# Altium footprint library PcbLib1.PcbLib: 43 footprints (part 3 of 3)
Each footprint in its own frame and in the unit in brackets; x right, y up, seen from the top. Pads: shape width x height; smd on the part's side, far side on the other; paste and mask are expansions set on the pad; w line width, h text height; cw(c..) or ccw(c..) is an arc to the next point about the centre after c.
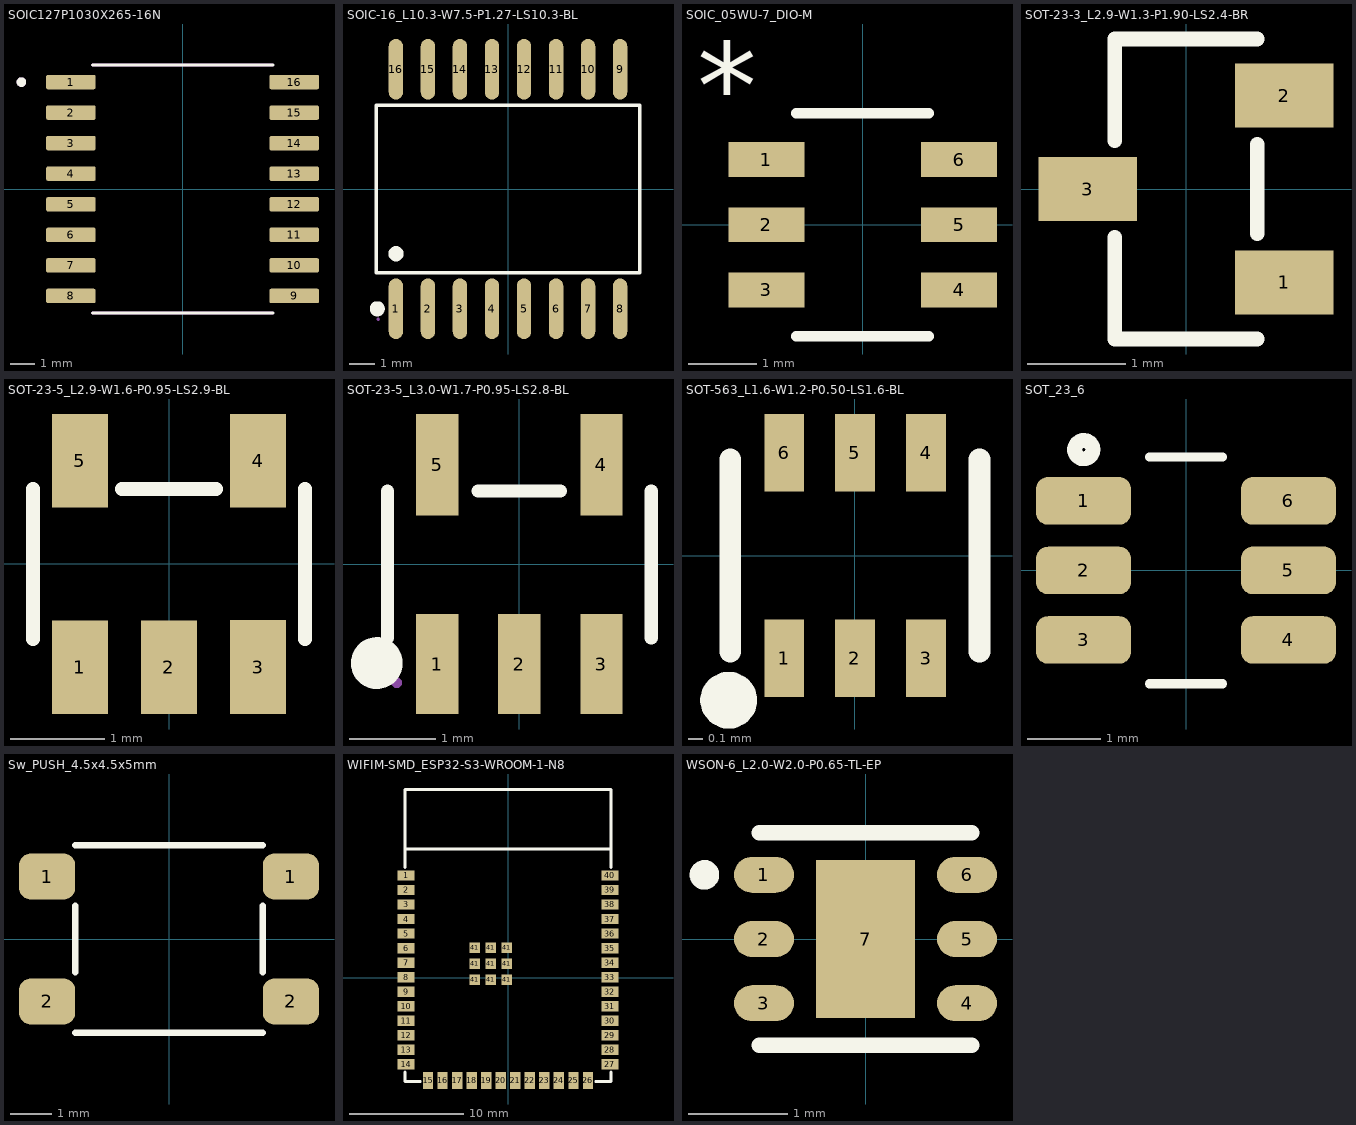
[diagram p2: the footprints below, top view; thin cyan lines are the x and y axes]

## SOIC127P1030X265-16N [mm]
height 2.65
pads (16):
  rrect25% 2.06x0.6 smd: 1(-4.64,4.445) 2(-4.64,3.175) 3(-4.64,1.905) 4(-4.64,0.635) 5(-4.64,-0.635) 6(-4.64,-1.905) 7(-4.64,-3.175) 8(-4.64,-4.445) 9(4.64,-4.445) 10(4.64,-3.175) 11(4.64,-1.905) 12(4.64,-0.635) 13(4.64,0.635) 14(4.64,1.905) 15(4.64,3.175) 16(4.64,4.445)
Top Overlay:
  circle w0.2: c-6.7,4.445 r0.1
  lines w0.127: -3.75,-5.15 3.75,-5.15 ; -3.75,5.15 3.75,5.15
Mechanical 13:
  circle w0.2: c-6.7,4.445 r0.1
  lines w0.127: -3.75,-5.15 3.75,-5.15 ; -3.75,5.15 3.75,5.15
3D body "step_temp.STEP": height 2.65, standoff 0, extent -5.15,-5.15 5.15,5.15

## SOIC-16_L10.3-W7.5-P1.27-LS10.3-BL [mil]
pads (16):
  oval 22.6x94.5 smd: 1(-175,-187) 2(-125,-187) 3(-75,-187) 4(-25,-187) 5(25,-187) 6(75,-187) 7(125,-187) 8(175,-187) 9(175,187) 10(125,187) 11(75,187) 12(25,187) 13(-25,187) 14(-75,187) 15(-125,187) 16(-175,187)
Top Overlay:
  lines w6: -205.7,-130.8 -205.7,130.7 205.8,130.7 205.8,-130.8 -205.7,-130.8
  lines w11.8: -210,-187 -209.6,-189.1 -208.6,-190.8 -207,-192.2 -205.1,-192.9 -203.1,-192.9 -201.1,-192.2 -199.6,-190.8 -198.5,-189.1 -198.2,-187 -198.5,-185 -199.6,-183.2 -201.1,-181.9 -203.1,-181.2 -205.1,-181.2 -207,-181.9 -208.6,-183.2 -209.6,-185 -210,-187 ; -180.9,-101.2 -180.5,-103.2 -179.5,-105 -177.9,-106.3 -176,-107 -174,-107 -172,-106.3 -170.5,-105 -169.4,-103.2 -169.1,-101.2 -169.4,-99.1 -170.5,-97.4 -172,-96 -174,-95.3 -176,-95.3 -177.9,-96 -179.5,-97.4 -180.5,-99.1 -180.9,-101.2
Mechanical 8:
  region: -200.4,-203.3 -200.8,-204.6 -201.8,-205.4 -203.1,-205.6 -204.3,-205.1 -205,-203.9 -205,-202.6 -204.3,-201.5 -203.1,-200.9 -201.8,-201.1 -200.8,-202
3D body "DW0016B.stp": height 101.81, standoff 0, extent -202.76,-203.44 202.76,203.44

## SOIC_05WU-7_DIO-M [mil]
pads (6):
  rect 43.5x20 smd paste+0: 1(-55.25,37.4) 2(-55.25,0) 3(-55.25,-37.4) 4(55.25,-37.4) 5(55.25,0) 6(55.25,37.4)
Top Overlay:
  lines w6: -38,-64 38,-64 ; -38,64 38,64
  text "*" at -95,55 h50
3D body "step_temp.STEP": height 39.37, standoff 0, extent -57.09,-57.09 57.09,57.09

## SOT-23-3_L2.9-W1.3-P1.90-LS2.4-BR [mm]
pads (3):
  rect 1.001x0.65 smd: 1(0.998,-0.95) 2(0.998,0.95) 3(-1.001,0)
Top Overlay:
  lines w0.152: -0.726,-0.495 -0.726,-1.527 0.724,-1.527 ; -0.726,0.495 -0.726,1.527 0.724,1.527 ; 0.724,-0.455 0.724,0.455

## SOT-23-5_L2.9-W1.6-P0.95-LS2.9-BL [mm]
pads (5):
  rect 0.6x1 smd paste+0: 1(-0.95,-1.1) 2(0,-1.1) 3(0.95,-1.1) 4(0.95,1.1) 5(-0.95,1.1)
Top Overlay:
  lines w0.15: -1.45,-0.8 -1.45,0.8 ; -0.5,0.8 0.5,0.8 ; 1.45,-0.8 1.45,0.8
3D body "SOT-23-5.STEP": height 1.2, standoff 0, extent -1.45,-1.4 1.45,1.4

## SOT-23-5_L3.0-W1.7-P0.95-LS2.8-BL [mm]
pads (5):
  rect 0.49x1.157 smd: 1(-0.95,-1.154) 2(0,-1.154) 3(0.95,-1.154)
  rect 0.49x1.175 smd: 4(0.95,1.154) 5(-0.95,1.154)
Top Overlay:
  circle w0.3: c-1.651,-1.143 r0.15
  lines w0.152: -1.526,-0.851 -1.526,0.851 ; -0.476,0.851 0.476,0.851 ; 1.526,-0.851 1.526,0.851
Mechanical 7:
  region: -1.125,0.74 -1.125,1.01 -0.775,1.01 -0.775,0.74
  region: 0.775,0.74 0.775,1.01 1.125,1.01 1.125,0.74
  region: 0.775,-1.01 0.775,-0.74 1.125,-0.74 1.125,-1.01
  region: -0.175,-1.01 -0.175,-0.74 0.175,-0.74 0.175,-1.01
  region: -1.125,-1.01 -1.125,-0.74 -0.775,-0.74 -0.775,-1.01
Mechanical 8:
  region: -1.36,-1.37 -1.36,-1.395 -1.395,-1.43 -1.445,-1.43 -1.48,-1.395 -1.48,-1.37 -1.48,-1.345 -1.445,-1.31 -1.395,-1.31 -1.36,-1.345 -1.36,-1.37
Mechanical 9:
  region: -1.125,1 -1.125,1.4 -0.775,1.4 -0.775,1
  region: 0.775,1 0.775,1.4 1.125,1.4 1.125,1
  region: 0.775,-1.4 0.775,-1 1.125,-1 1.125,-1.4
  region: -0.175,-1.4 -0.175,-1 0.175,-1 0.175,-1.4
  region: -1.125,-1.4 -1.125,-1 -0.775,-1 -0.775,-1.4

## SOT-563_L1.6-W1.2-P0.50-LS1.6-BL [mil]
pads (6):
  rect 11x21.5 smd: 1(-19.6,-28.4) 2(0,-28.4) 3(19.7,-28.4) 4(19.7,28.5) 5(0,28.5) 6(-19.6,28.5)
Top Overlay:
  lines w6: -34.5,-26.6 -34.5,26.7 ; 34.5,-26.6 34.5,26.7
  lines w7.9: -38.9,-40 -38.5,-38.3 -37.4,-36.9 -35.8,-36.1 -34.1,-36.1 -32.5,-36.9 -31.4,-38.3 -31,-40 -31.4,-41.7 -32.5,-43 -34.1,-43.8 -35.8,-43.8 -37.4,-43 -38.5,-41.7 -38.9,-40

## SOT_23_6 [mm]
height 1.45
pads (6):
  rrect50% 1.3x0.65 smd: 1(-1.4,0.95) 2(-1.4,0) 3(-1.4,-0.95) 4(1.4,-0.95) 5(1.4,0) 6(1.4,0.95)
Top Overlay:
  circle w0.203: c-1.397,1.651 r0.125
  lines w0.127: -0.5,-1.55 0.5,-1.55 ; -0.5,1.55 0.5,1.55
3D body "SOT23-6-2.step": height 1.45, standoff 0, extent -1.501,-1.45 1.299,1.45

## Sw_PUSH_4.5x4.5x5mm [mm]
pads (4):
  rrect50% 1.35x1.1 smd: 1(-2.925,1.5) 1(2.925,1.5) 2(-2.925,-1.5) 2(2.925,-1.5)
Top Overlay:
  lines w0.152: -2.25,-2.25 2.25,-2.25 ; -2.25,-0.8 -2.25,0.8 ; -2.25,2.25 2.25,2.25 ; 2.25,-0.8 2.25,0.8
3D body: height 5, standoff 0, extent -1.22,-1.22 1.22,1.22
3D body: height 2.75, standoff 0, extent -2.25,-2.25 2.25,2.25

## WIFIM-SMD_ESP32-S3-WROOM-1-N8 [mil]
pads (49):
  rect 59.1x35.4 smd paste+0: 1(-350.4,352.5) 2(-350.4,302.5) 3(-350.4,252.5) 4(-350.4,202.5) 5(-350.4,152.5) 6(-350.4,102.5) 7(-350.4,52.5) 8(-350.4,2.5) 9(-350.4,-47.5) 10(-350.4,-97.5) 11(-350.4,-147.5) 12(-350.4,-197.5) 13(-350.4,-247.5) 14(-350.4,-297.5) 27(350.4,-297.5) 28(350.4,-247.5) 29(350.4,-197.5) 30(350.4,-147.5) 31(350.4,-97.5) 32(350.4,-47.5) 33(350.4,2.5) 34(350.4,52.5) 35(350.4,102.5) 36(350.4,152.5) 37(350.4,202.5) 38(350.4,252.5) 39(350.4,302.5) 40(350.4,352.5)
  rect 35.4x59.1 smd paste+0: 15(-275,-352.6) 16(-225,-352.6) 17(-175,-352.6) 18(-125,-352.6) 19(-75,-352.6) 20(-25,-352.6) 21(25,-352.6) 22(75,-352.6) 23(125,-352.6) 24(175,-352.6) 25(225,-352.6) 26(275,-352.6)
  rect 35.4x35.4 smd: 41(-114.1,-6.5) 41(-114.1,48.6) 41(-114.1,103.7) 41(-59,-6.5) 41(-59,48.6) 41(-59,103.7) 41(-3.9,-6.5) 41(-3.9,48.6) 41(-3.9,103.7)
Top Overlay:
  lines w10: -354.3,-324.3 -354.3,-356.5 -301.8,-356.5 ; -354.3,379.3 -354.3,434.8 ; -354.3,432.9 -354.3,647.4 354.3,647.4 354.3,379.3 ; -354.3,443.5 354.3,443.5 ; 301.8,-356.5 354.3,-356.5 354.3,-324.3
Mechanical 8:
  region: -352,647.4 -352.3,646.2 -353.3,645.3 -354.7,645.1 -355.9,645.6 -356.6,646.8 -356.6,648.1 -355.9,649.2 -354.7,649.8 -353.3,649.6 -352.3,648.7
3D body "ESP32-S3-WROOM-1-N16R8.STEP": height 127.95, standoff 0, extent -354.33,-356.97 354.33,646.97

## WSON-6_L2.0-W2.0-P0.65-TL-EP [mm]
pads (7):
  oval 0.607x0.364 smd: 1(-1.028,0.65) 2(-1.028,0) 3(-1.028,-0.65) 4(1.028,-0.65) 5(1.028,0) 6(1.028,0.65)
  rect 1x1.6 smd: 7(0,0)
Top Overlay:
  circle w0.15: c-1.632,0.65 r0.075
  lines w0.152: -1.076,-1.076 1.076,-1.076 ; -1.076,1.076 1.076,1.076